# Altium footprint library Chris_R.PcbLib: 69 footprints (part 5 of 5)
Each footprint in its own frame and in the unit in brackets; x right, y up, seen from the top. Pads: shape width x height; smd on the part's side, far side on the other; paste and mask are expansions set on the pad; w line width, h text height; cw(c..) or ccw(c..) is an arc to the next point about the centre after c.
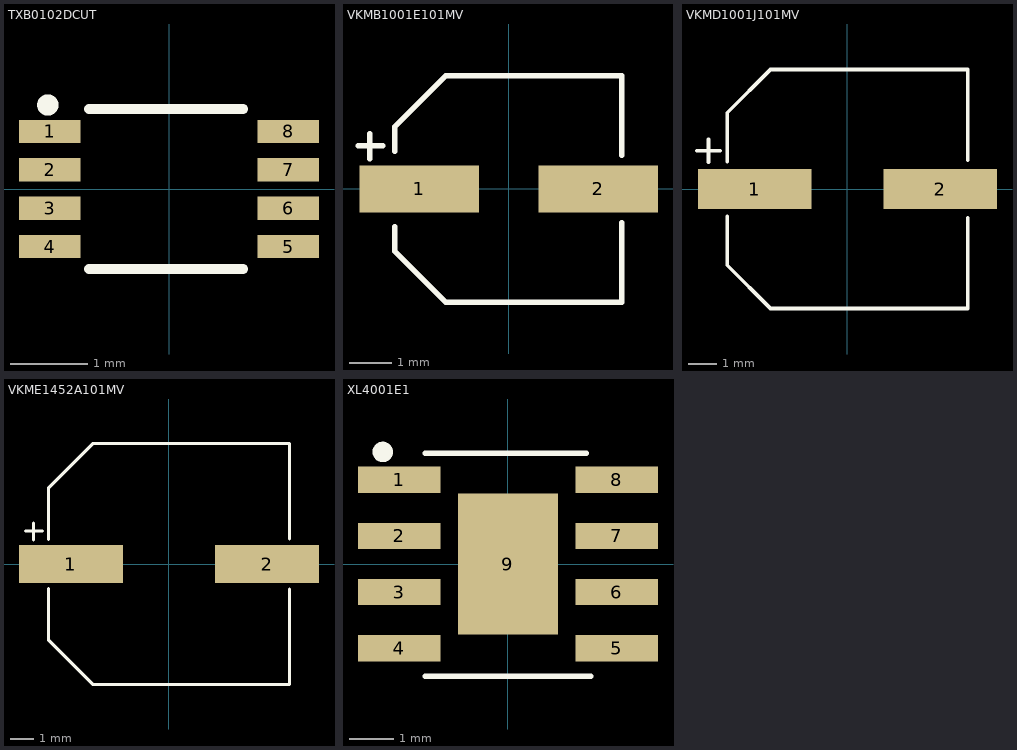
[diagram p4: the footprints below, top view; thin cyan lines are the x and y axes]

## TXB0102DCUT [mm]
pads (8):
  rect 0.8x0.3 smd: 1(-1.55,0.75) 2(-1.55,0.25) 3(-1.55,-0.25) 4(-1.55,-0.75) 5(1.55,-0.75) 6(1.55,-0.25) 7(1.55,0.25) 8(1.55,0.75)
Top Overlay:
  circle w0.2: c-1.575,1.092 r0.038
  lines w0.127: -1.041,-1.041 0.965,-1.041 ; -1.041,1.041 0.965,1.041
3D body "TXB0102DCUT.STEP": height 0.9, standoff 0, extent -1.55,-1 1.55,1

## VKMB1001E101MV [mm] "25V 5mm 10mm 100uF"
pads (2):
  rect 2.8x1.1 smd: 1(-2.1,0) 2(2.1,0)
Top Overlay:
  lines w0.127: -3.531,1.016 -2.946,1.016 ; -3.251,0.711 -3.251,1.295 ; -2.667,-0.889 -2.667,-1.46 -1.478,-2.65 2.65,-2.65 2.65,-0.787 ; -2.667,0.889 -2.667,1.46 -1.478,2.65 2.65,2.65 2.65,0.787
3D body "vkmb1001e101mv_stp__C487322.stp": height 9.95, standoff -0.05, extent -3.15,-2.65 3.15,2.65

## VKMD1001J101MV [mm] "63V 10mm 8mm 100uF ±20%"
pads (2):
  rect 4x1.4 smd: 1(-3.275,0) 2(3.275,0)
Top Overlay:
  lines w0.127: -5.309,1.346 -4.496,1.346 ; -4.902,0.94 -4.902,1.753 ; -4.242,-0.965 -4.242,-2.692 -2.718,-4.216 4.242,-4.216 4.242,-1.016 ; -4.242,0.965 -4.242,2.692 -2.718,4.216 4.242,4.216 4.242,1.016
3D body "vkmd1001j101mv_c487384.stp": height 9.95, standoff -0.05, extent -4.65,-4.15 4.65,4.15

## VKME1452A101MV [mm] "CAP ALUM 100uF 100V SMD"
pads (2):
  rect 4.5x1.65 smd: 1(-4.25,0) 2(4.25,0)
Top Overlay:
  lines w0.127: -6.223,1.422 -5.486,1.422 ; -5.867,1.041 -5.867,1.778 ; -5.212,-1.067 -5.212,-3.305 -3.305,-5.212 5.212,-5.212 5.212,-1.092 ; -5.212,1.067 -5.212,3.305 -3.305,5.212 5.212,5.212 5.212,1.092

## XL4001E1 [mm]
pads (9):
  rect 1.87x0.6 smd: 1(-2.465,1.905) 2(-2.465,0.635) 3(-2.465,-0.635) 4(-2.465,-1.905) 5(2.465,-1.905) 6(2.465,-0.635) 7(2.465,0.635) 8(2.465,1.905)
  rect 2.26x3.2 smd: 9(0,0)
Top Overlay:
  circle w0.254: c-2.838,2.54 r0.105
  lines w0.127: -1.88,-2.54 1.88,-2.54 ; -1.88,2.515 1.778,2.515
3D body "User Library-HSOP8-1.STEP": height 1.74, standoff -0.01, extent -3.075,-2.536 3.125,2.464